# Altium footprint library 2N7002,215.PcbLib: 1 footprints
Each footprint in its own frame and in the unit in brackets; x right, y up, seen from the top. Pads: shape width x height; smd on the part's side, far side on the other; paste and mask are expansions set on the pad; w line width, h text height; cw(c..) or ccw(c..) is an arc to the next point about the centre after c.
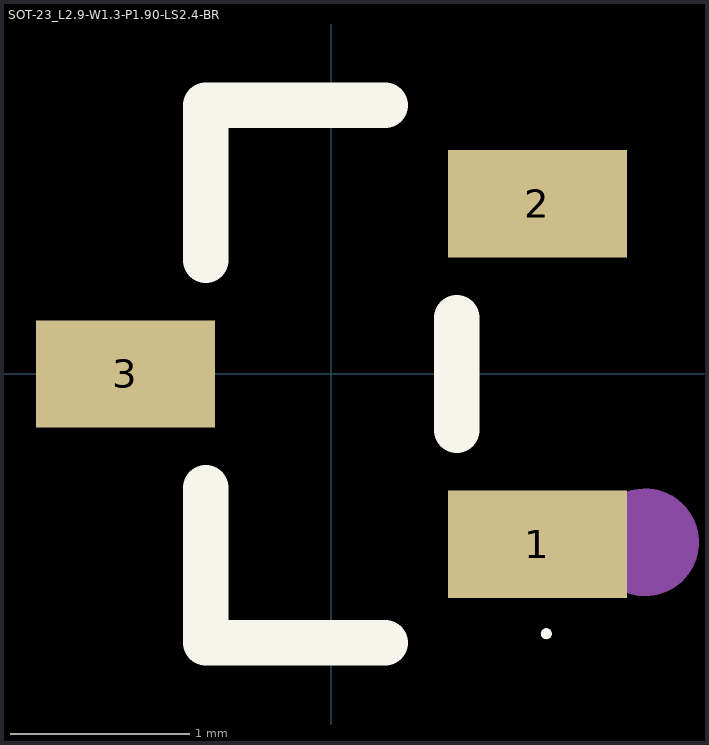
[diagram p0: the footprint, top view; thin cyan lines are the x and y axes]

## SOT-23_L2.9-W1.3-P1.90-LS2.4-BR [mm] "1个N沟道 耐压:60V 电流:300mA 数量:1个N沟道 漏源电压(Vdss):60V 连续漏极电流(Id):300mA 导通电阻(RDS(on)):5Ω@10V 耗散功率(Pd):830mW 阈值电压(Vgs(th)):2.5V 型号:2N7002,215 LCSC C65189 厂牌:Nexperia(安世)"
height 1
pads (3):
  rect 1x0.6 smd mask+0.05: 1(1.15,-0.95) 2(1.15,0.95) 3(-1.15,0)
Top Overlay:
  region: 1.23,-1.45 1.229,-1.444 1.228,-1.439 1.225,-1.433 1.221,-1.429 1.217,-1.425 1.211,-1.422 1.206,-1.421 1.2,-1.42 1.194,-1.421 1.189,-1.422 1.183,-1.425 1.179,-1.429 1.175,-1.433 1.172,-1.439 1.171,-1.444 1.17,-1.45 1.171,-1.456 1.172,-1.462 1.175,-1.467 1.179,-1.471 1.183,-1.475 1.189,-1.478 1.194,-1.479 1.2,-1.48 1.206,-1.479 1.211,-1.478 1.217,-1.475 1.221,-1.471 1.225,-1.467 1.228,-1.462 1.229,-1.456
  lines w0.254: -0.7,-0.636 -0.7,-1.5 0.3,-1.5 ; -0.7,0.636 -0.7,1.5 0.3,1.5 ; 0.7,-0.314 0.7,0.314
Mechanical 2:
  circle w0.3: c1.753,-0.94 r0.15
3D body "SOT-23_L2.9-W1.3-P1.90-LS2.4-BR.step": height 1, standoff 0, extent -1.75,-1.6 2.003,1.6